# Altium footprint library SnapEDApcb.PcbLib: 1 footprints
Each footprint in its own frame and in the unit in brackets; x right, y up, seen from the top. Pads: shape width x height; smd on the part's side, far side on the other; paste and mask are expansions set on the pad; w line width, h text height; cw(c..) or ccw(c..) is an arc to the next point about the centre after c.
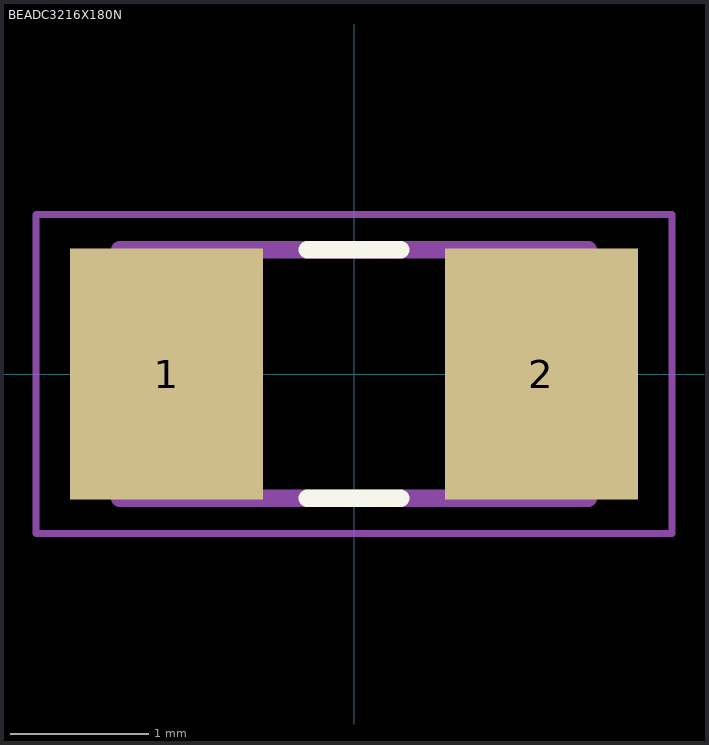
[diagram p0: the footprint, top view; thin cyan lines are the x and y axes]

## BEADC3216X180N [mm]
pads (2):
  rect 1.4x1.82 smd: 1(-1.36,0) 2(1.36,0)
Top Overlay:
  lines w0.127: -0.34,-0.9 0.34,-0.9 ; -0.34,0.9 0.34,0.9
Mechanical 13:
  lines w0.127: -1.7,-0.9 -1.7,0.9 1.7,0.9 1.7,-0.9 -1.7,-0.9
Mechanical 15:
  lines w0.05: -2.308,-1.158 -2.308,1.158 2.308,1.158 2.308,-1.158 -2.308,-1.158
3D body "BLM31KN601SN1L.stp": height 1.61, standoff 0.01, extent -1.6,-0.838 1.6,0.762